# Altium footprint library Footprint.PcbLib: 411 footprints (part 15 of 26)
Each footprint in its own frame and in the unit in brackets; x right, y up, seen from the top. Pads: shape width x height; smd on the part's side, far side on the other; paste and mask are expansions set on the pad; w line width, h text height; cw(c..) or ccw(c..) is an arc to the next point about the centre after c.
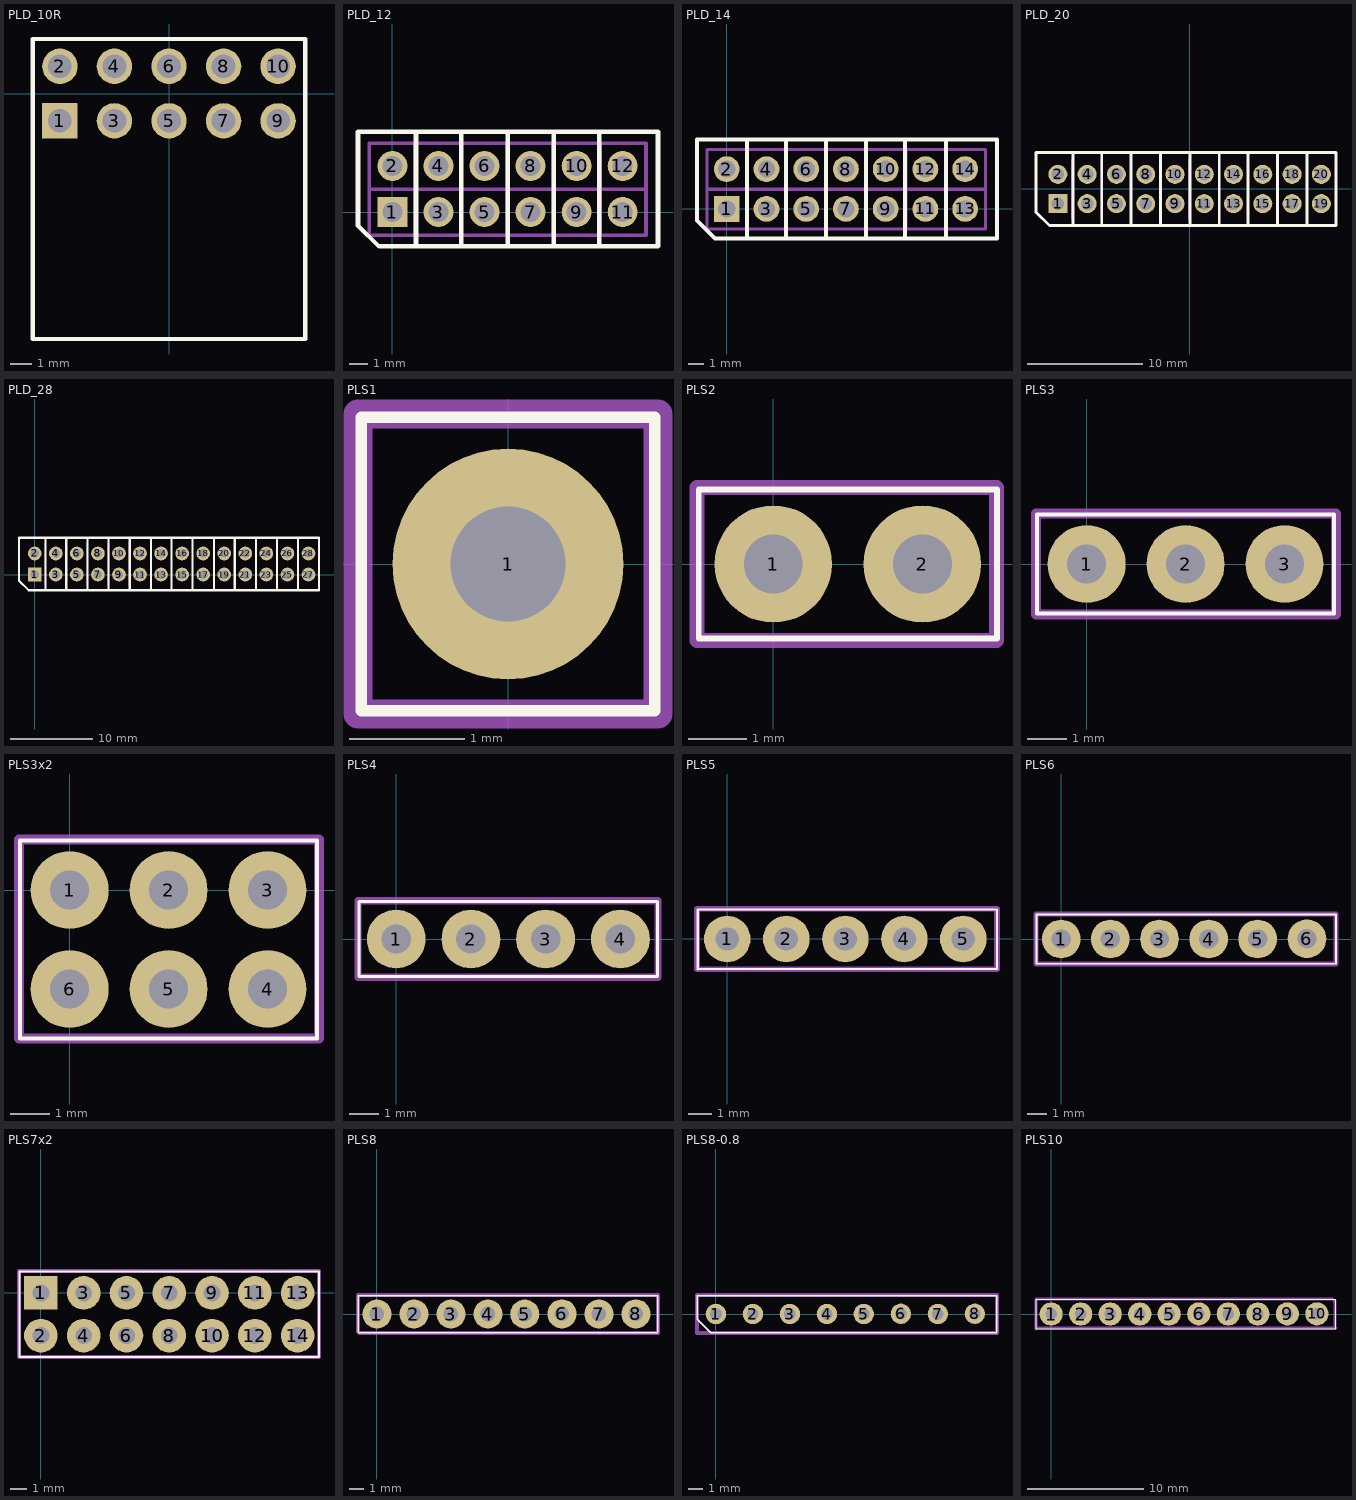
[diagram p14: the footprints below, top view; thin cyan lines are the x and y axes]

## PLD_10R [mm] "HEADER_2X5R"
pads (10):
  rect 1.65x1.65 hole 1.1: 1(-5.08,-1.27)
  round 1.65 hole 1.1: 2(-5.08,1.27) 3(-2.54,-1.27) 4(-2.54,1.27) 5(0,-1.27) 6(0,1.27) 7(2.54,-1.27) 8(2.54,1.27) 9(5.08,-1.27) 10(5.08,1.27)
Top Overlay:
  lines w0.2: -6.35,-11.43 -6.35,2.54 6.35,2.54 6.35,-11.43 -6.35,-11.43
3D body "pin_header_awl254-da-g10d.stp": height 5.04, standoff -2.96, extent -6.35,-11.3 6.35,1.58

## PLD_12 [mm] "HEADER_2X6"
pads (12):
  rect 1.65x1.65 hole 1.1: 1(0,0)
  round 1.65 hole 1.1: 2(0,2.54) 3(2.54,0) 4(2.54,2.54) 5(5.08,0) 6(5.08,2.54) 7(7.62,0) 8(7.62,2.54) 9(10.16,0) 10(10.16,2.54) 11(12.7,0) 12(12.7,2.54)
Top Overlay:
  lines w0.25: 1.3,-1.9 1.3,4.44 ; 3.8,-1.9 3.8,4.44 ; 6.35,-1.9 6.35,4.44 ; 8.9,-1.9 8.9,4.44 ; 11.4,-1.9 11.4,4.44 ; 14.65,4.375 14.65,-1.9 -0.74,-1.9 -1.9,-0.75 -1.9,4.44 14.65,4.44
Mechanical 1:
  lines w0.2: 1.255,-1.29 1.255,1.25 1.255,3.79 ; 3.795,-1.29 3.795,1.25 3.795,3.79 ; 6.335,-1.29 6.335,1.25 6.335,3.79 ; 8.91,-1.325 8.91,3.795 11.45,3.795 ; 8.91,-1.285 11.45,-1.285 13.99,-1.285 ; 8.91,1.255 11.45,1.255 ; 11.45,-1.225 11.45,3.795 ; 11.455,1.25 13.995,1.25 ; 13.99,-1.225 13.99,3.795 11.45,3.795 ; -1.285,1.25 -1.285,-1.29 8.875,-1.29 8.875,1.25 ; -1.285,1.25 8.875,1.25 ; -1.285,1.25 8.875,1.25 ; -1.285,1.25 -1.285,3.79 8.875,3.79 8.875,1.25
3D body "PLD.STEP": height 8.64, standoff -2.9, extent -1.245,-1.225 1.295,3.775
3D body "PLD.STEP": height 8.64, standoff -2.9, extent 1.295,-1.225 3.835,3.775
3D body "PLD.STEP": height 8.64, standoff -2.9, extent 3.835,-1.225 6.375,3.775
3D body "PLD.STEP": height 8.64, standoff -2.9, extent 6.375,-1.225 8.915,3.775
3D body "PLD.STEP": height 8.64, standoff -2.9, extent 8.915,-1.225 11.455,3.775
3D body "PLD.STEP": height 8.64, standoff -2.9, extent 11.455,-1.225 13.995,3.775

## PLD_14 [mm] "HEADER_2X6"
pads (14):
  rect 1.65x1.65 hole 1.1: 1(0,0)
  round 1.65 hole 1.1: 2(0,2.54) 3(2.54,0) 4(2.54,2.54) 5(5.08,0) 6(5.08,2.54) 7(7.62,0) 8(7.62,2.54) 9(10.16,0) 10(10.16,2.54) 11(12.7,0) 12(12.7,2.54) 13(15.24,0) 14(15.24,2.54)
Top Overlay:
  lines w0.25: 1.3,-1.9 1.3,4.44 ; 3.8,-1.9 3.8,4.44 ; 6.35,-1.9 6.35,4.44 ; 8.9,-1.9 8.9,4.44 ; 11.4,-1.9 11.4,4.44 ; 14.025,-1.875 14.025,4.4 ; -1.9,-0.75 -0.74,-1.9 17.275,-1.9 17.275,4.44 -1.9,4.44 -1.9,-0.75
Mechanical 1:
  lines w0.2: -1.25,-1.285 1.29,-1.285 3.83,-1.285 6.37,-1.285 8.91,-1.285 11.45,-1.285 13.99,-1.285 16.53,-1.285 ; -1.25,-1.225 -1.25,3.795 1.29,3.795 ; -1.245,1.25 1.295,1.25 3.835,1.25 6.375,1.25 8.915,1.25 11.455,1.25 13.995,1.25 16.535,1.25 ; 16.53,-1.225 16.53,3.795 13.99,3.795 ; 1.29,3.795 1.29,-1.225 1.29,3.795 ; 1.29,3.795 3.83,3.795 ; 3.83,3.795 3.83,-1.225 3.83,3.795 ; 3.83,3.795 6.37,3.795 ; 6.37,3.795 6.37,-1.225 6.37,3.795 ; 6.37,3.795 8.91,3.795 ; 8.91,3.795 8.91,-1.225 8.91,3.795 ; 8.91,3.795 11.45,3.795 ; 11.45,3.795 11.45,-1.225 11.45,3.795 ; 11.45,3.795 13.99,3.795 ; 13.99,3.795 13.99,-1.225 13.99,3.795
3D body "PLD.STEP": height 8.64, standoff -2.9, extent 14.005,-1.225 16.545,3.775
3D body "PLD.STEP": height 8.64, standoff -2.9, extent 11.455,-1.225 13.995,3.775
3D body "PLD.STEP": height 8.64, standoff -2.9, extent 8.915,-1.225 11.455,3.775
3D body "PLD.STEP": height 8.64, standoff -2.9, extent 6.375,-1.225 8.915,3.775
3D body "PLD.STEP": height 8.64, standoff -2.9, extent 3.835,-1.225 6.375,3.775
3D body "PLD.STEP": height 8.64, standoff -2.9, extent 1.295,-1.225 3.835,3.775
3D body "PLD.STEP": height 8.64, standoff -2.9, extent -1.245,-1.225 1.295,3.775

## PLD_20 [mm] "HEADER_2X5"
pads (20):
  rect 1.65x1.65 hole 1.1: 1(-11.43,-1.27)
  round 1.65 hole 1.1: 2(-11.43,1.27) 3(-8.89,-1.27) 4(-8.89,1.27) 5(-6.35,-1.27) 6(-6.35,1.27) 7(-3.81,-1.27) 8(-3.81,1.27) 9(-1.27,-1.27) 10(-1.27,1.27) 11(1.27,-1.27) 12(1.27,1.27) 13(3.81,-1.27) 14(3.81,1.27) 15(6.35,-1.27) 16(6.35,1.27) 17(8.89,-1.27) 18(8.89,1.27) 19(11.43,-1.27) 20(11.43,1.27)
Top Overlay:
  lines w0.25: -10.13,-3.17 -10.13,3.17 ; -7.63,-3.17 -7.63,3.17 ; -5.08,-3.17 -5.08,3.17 ; -2.53,-3.17 -2.53,3.17 ; 0.03,-3.17 0.03,3.17 ; 2.57,-3.17 2.57,3.17 ; 5.07,-3.17 5.07,3.17 ; 7.62,-3.17 7.62,3.17 ; 10.17,-3.17 10.17,3.17 ; -13.33,-2.02 -12.17,-3.17 12.7,-3.17 12.7,3.17 -13.33,3.17 -13.33,-2.02
Mechanical 1:
  lines w0.2: -10.175,-2.56 -10.175,-0.02 -10.175,2.52 ; -7.635,-2.56 -7.635,-0.02 -7.635,2.52 ; -5.095,-2.56 -5.095,-0.02 -5.095,2.52 ; -2.555,-2.56 -2.555,-0.02 -2.555,2.52 ; -2.52,-2.595 -2.52,2.525 ; -0.03,-2.555 -0.03,2.525
3D body "PLD.STEP": height 8.64, standoff -2.9, extent 10.185,-2.495 12.725,2.505
3D body "PLD.STEP": height 8.64, standoff -2.9, extent 7.645,-2.495 10.185,2.505
3D body "PLD.STEP": height 8.64, standoff -2.9, extent 5.105,-2.495 7.645,2.505
3D body "PLD.STEP": height 8.64, standoff -2.9, extent 2.565,-2.495 5.105,2.505
3D body "PLD.STEP": height 8.64, standoff -2.9, extent 0.025,-2.495 2.565,2.505
3D body "PLD.STEP": height 8.64, standoff -2.9, extent -2.515,-2.495 0.025,2.505
3D body "PLD.STEP": height 8.64, standoff -2.9, extent -5.055,-2.495 -2.515,2.505
3D body "PLD.STEP": height 8.64, standoff -2.9, extent -7.595,-2.495 -5.055,2.505
3D body "PLD.STEP": height 8.64, standoff -2.9, extent -10.135,-2.495 -7.595,2.505
3D body "PLD.STEP": height 8.64, standoff -2.9, extent -12.675,-2.495 -10.135,2.505

## PLD_28 [mm] "HEADER_2X5"
pads (28):
  rect 1.65x1.65 hole 1.02: 1(0,0)
  round 1.65 hole 1.02: 2(0,2.54) 3(2.54,0) 4(2.54,2.54) 5(5.08,0) 6(5.08,2.54) 7(7.62,0) 8(7.62,2.54) 9(10.16,0) 10(10.16,2.54) 11(12.7,0) 12(12.7,2.54) 13(15.24,0) 14(15.24,2.54) 15(17.78,0) 16(17.78,2.54) 17(20.32,0) 18(20.32,2.54) 19(22.86,0) 20(22.86,2.54) 21(25.4,0) 22(25.4,2.54) 23(27.94,0) 24(27.94,2.54) 25(30.48,0) 26(30.48,2.54) 27(33.02,0) 28(33.02,2.54)
Top Overlay:
  lines w0.25: 1.3,-1.9 1.3,4.44 ; 3.8,-1.9 3.8,4.44 ; 6.35,-1.9 6.35,4.44 ; 8.9,-1.9 8.9,4.44 ; 11.46,-1.9 11.46,4.44 ; 14,-1.9 14,4.44 ; 16.5,-1.9 16.5,4.44 ; 19.05,-1.9 19.05,4.44 ; 21.6,-1.9 21.6,4.44 ; 24.13,-1.9 24.13,4.44 ; 26.67,-1.9 26.67,4.44 ; 29.21,-1.9 29.21,4.44 ; 31.75,-1.9 31.75,4.44 ; -1.9,-0.75 -0.74,-1.9 34.29,-1.9 34.29,4.44 -1.9,4.44 -1.9,-0.75
Mechanical 1:
  lines w0.2: 1.255,-1.29 1.255,1.25 1.255,3.79 ; 3.795,-1.29 3.795,1.25 3.795,3.79 ; 6.335,-1.29 6.335,1.25 6.335,3.79 ; 8.875,-1.29 8.875,1.25 8.875,3.79 ; 8.91,-1.325 8.91,3.795 ; 11.4,-1.285 11.4,3.795
3D body "PLD.STEP": height 8.64, standoff -2.9, extent 21.615,-1.225 24.155,3.775
3D body "PLD.STEP": height 8.64, standoff -2.9, extent 19.075,-1.225 21.615,3.775
3D body "PLD.STEP": height 8.64, standoff -2.9, extent 16.535,-1.225 19.075,3.775
3D body "PLD.STEP": height 8.64, standoff -2.9, extent 13.995,-1.225 16.535,3.775
3D body "PLD.STEP": height 8.64, standoff -2.9, extent 11.455,-1.225 13.995,3.775
3D body "PLD.STEP": height 8.64, standoff -2.9, extent 8.915,-1.225 11.455,3.775
3D body "PLD.STEP": height 8.64, standoff -2.9, extent 6.375,-1.225 8.915,3.775
3D body "PLD.STEP": height 8.64, standoff -2.9, extent 3.835,-1.225 6.375,3.775
3D body "PLD.STEP": height 8.64, standoff -2.9, extent 1.295,-1.225 3.835,3.775
3D body "PLD.STEP": height 8.64, standoff -2.9, extent -1.245,-1.225 1.295,3.775
3D body "PLD.STEP": height 8.64, standoff -2.9, extent 24.155,-1.225 26.695,3.775
3D body "PLD.STEP": height 8.64, standoff -2.9, extent 26.695,-1.225 29.235,3.775
3D body "PLD.STEP": height 8.64, standoff -2.9, extent 29.235,-1.225 31.775,3.775
3D body "PLD.STEP": height 8.64, standoff -2.9, extent 31.775,-1.225 34.315,3.775

## PLS1 [mm]
pads (1):
  round 2 hole 1: 1(0,0)
Top Overlay:
  lines w0.1: -1.27,-1.27 1.27,-1.27 1.27,1.27 -1.27,1.27 -1.27,-1.27
Mechanical 15:
  circle w0.254: c0,0 r0.141
  lines w0.254: -1.3,-1.3 1.3,-1.3 1.3,1.3 -1.3,1.3 -1.3,-1.3
  text ".Designator" at -1.2,1.5 h1.52

## PLS2 [mm]
pads (2):
  round 2 hole 1: 1(0,0) 2(2.54,0)
Top Overlay:
  lines w0.1: -1.27,-1.27 3.81,-1.27 3.81,1.27 -1.27,1.27 -1.27,-1.27
Mechanical 15:
  circle w0.254: c0,0 r0.141
  lines w0.254: -1.3,-1.3 3.8,-1.3 3.8,1.3 -1.3,1.3 -1.3,-1.3
  text ".Designator" at -1.2,1.5 h1.52

## PLS3 [mm]
pads (3):
  round 2 hole 1: 1(0,0) 2(2.54,0) 3(5.08,0)
Top Overlay:
  lines w0.1: -1.27,-1.27 -1.27,1.27 6.35,1.27 6.35,-1.27 -1.27,-1.27
Mechanical 15:
  circle w0.254: c0,0 r0.224
  lines w0.254: -1.3,-1.3 -1.3,1.3 6.4,1.3 6.4,-1.3 -1.3,-1.3
  text ".Designator" at -0.5,1.5 h1.52

## PLS3x2 [mm]
pads (6):
  round 2 hole 1: 1(0,0) 2(2.54,0) 3(5.08,0) 4(5.08,-2.54) 5(2.54,-2.54) 6(0,-2.54)
Top Overlay:
  lines w0.1: -1.27,-3.81 6.35,-3.81 6.35,1.27 -1.27,1.27 -1.27,-3.81
Mechanical 15:
  circle w0.254: c0,0 r0.224
  lines w0.254: -1.3,-3.81 6.4,-3.81 6.4,1.3 -1.3,1.3 -1.3,-3.81
  text ".Designator" at -0.5,1.5 h1.52

## PLS4 [mm]
pads (4):
  round 2 hole 1: 1(0,0) 2(2.54,0) 3(5.08,0) 4(7.62,0)
Top Overlay:
  lines w0.1: -1.27,-1.27 -1.27,1.27 8.89,1.27 8.89,-1.27 -1.27,-1.27
Mechanical 15:
  circle w0.254: c0,0 r0.141
  lines w0.254: -1.3,-1.3 8.9,-1.3 8.9,1.3 -1.3,1.3 -1.3,-1.3
  text ".Designator" at -1.3,1.6 h1.52

## PLS5 [mm]
pads (5):
  round 2 hole 1: 1(0,0) 2(2.54,0) 3(5.08,0) 4(7.62,0) 5(10.15,0)
Top Overlay:
  lines w0.1: -1.27,-1.3 11.6,-1.292 11.6,1.27 -1.27,1.27 -1.27,-1.3
Mechanical 15:
  circle w0.254: c0,0 r0.1
  lines w0.254: -1.3,-1.3 -1.3,1.3 11.6,1.3 11.6,-1.3 -1.3,-1.3
  text ".Designator" at -1.3,1.6 h1.52

## PLS6 [mm]
pads (6):
  round 2 hole 1: 1(0,0) 2(2.54,0) 3(5.08,0) 4(7.62,0) 5(10.15,0) 6(12.7,0.01)
Top Overlay:
  lines w0.1: -1.28,-1.28 14.19,-1.27 14.19,1.27 -1.27,1.27 -1.27,-1.27
Mechanical 15:
  circle w0.254: c0,0 r0.1
  lines w0.254: -1.3,-1.3 -1.3,1.3 14.2,1.3 14.2,-1.3 -1.3,-1.3
  text ".Designator" at -1.3,1.6 h1.52

## PLS7x2 [mm]
pads (14):
  rect 2x2 hole 1: 1(0,0)
  round 2 hole 1: 2(0,-2.54) 3(2.54,0) 4(2.54,-2.54) 5(5.08,0) 6(5.08,-2.54) 7(7.62,0) 8(7.62,-2.54) 9(10.16,0) 10(10.16,-2.54) 11(12.7,0) 12(12.7,-2.54) 13(15.24,0) 14(15.24,-2.54)
Top Overlay:
  lines w0.1: -1.27,-3.81 -1.27,1.27 16.51,1.27 16.51,-3.81 -1.27,-3.81
Mechanical 15:
  circle w0.254: c0,0 r0.224
  lines w0.254: -1.3,-3.81 -1.3,1.3 16.51,1.3 16.51,-3.81 -1.3,-3.81
  text ".Designator" at -0.5,1.5 h1.52

## PLS8 [mm]
pads (8):
  round 2 hole 1: 1(0,0) 2(2.54,0) 3(5.08,0) 4(7.62,0) 5(10.15,0) 6(12.7,0.01) 7(15.24,0) 8(17.78,0.01)
Top Overlay:
  lines w0.1: -1.28,-1.28 19.29,-1.28 ; -1.27,-1.27 -1.27,1.27 19.28,1.27 ; 19.29,-1.27 19.29,1.27
Mechanical 15:
  circle w0.254: c0,0 r0.141
  lines w0.254: -1.3,-1.2 -1.3,1.3 19.3,1.3 19.3,-1.3 -1.2,-1.3 -1.3,-1.2
  text ".Designator" at 0.2,1.7 h1.52

## PLS8-0.8 [mm]
pads (8):
  round 1.4 hole 0.8: 1(0,0) 2(2.54,0) 3(5.08,0) 4(7.62,0) 5(10.15,0) 6(12.7,0.01) 7(15.24,0) 8(17.78,0.01)
Top Overlay:
  lines w0.1: -1.27,-0.37 -1.267,1.271 ; -1.27,1.27 19.28,1.27 ; -1.267,-0.374 -0.35,-1.29 ; -0.353,-1.29 19.29,-1.28 ; 19.29,-1.27 19.29,1.27
Mechanical 15:
  circle w0.254: c0,0 r0.141
  lines w0.254: -1.3,-1.3 -1.3,1.3 19.3,1.3 19.3,-1.3 -1.3,-1.3
  text ".Designator" at -0.4,1.6 h1.52

## PLS10 [mm]
pads (10):
  round 2 hole 1: 1(0,0) 2(2.54,0) 3(5.08,0) 4(7.62,0) 5(10.15,0) 6(12.7,0.01) 7(15.24,0) 8(17.78,0) 9(20.32,0.01) 10(22.86,0.01)
Top Overlay:
  lines w0.1: -1.28,-1.28 24.46,-1.27 24.46,1.27 -1.27,1.27 -1.27,-1.27
Mechanical 15:
  circle w0.254: c0,0 r0.361
  lines w0.254: -1.3,-1.3 -1.3,1.3 24.2,1.3 24.4,1.1 24.4,-1.1 24.5,-1.2 -1.2,-1.2 -1.3,-1.3